# Altium schematic symbol library EC57-23 Stepper Motor.SchLib: 2 symbols
Pins are listed as number, name and electrical type; pins without a type are passive.

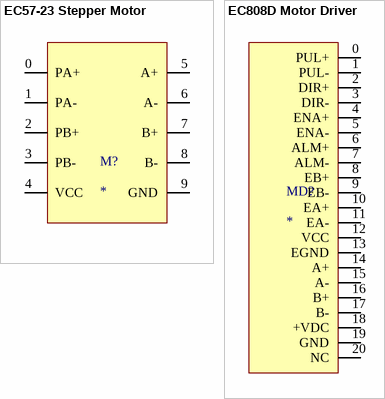
[diagram p0: symbols EC57-23 Stepper Motor to EC808D Motor Driver]

## EC57-23 Stepper Motor
designator M?
pins: 0 PA+, 1 PA-, 2 PB+, 3 PB-, 4 VCC (power), 5 A+, 6 A-, 7 B+, 8 B-, 9 GND (power)

## EC808D Motor Driver
designator MD?
pins: 0 PUL+, 1 PUL-, 2 DIR+, 3 DIR-, 4 ENA+, 5 ENA-, 6 ALM+, 7 ALM-, 8 EB+, 9 EB-, 10 EA+, 11 EA-, 12 VCC, 13 EGND, 14 A+, 15 A-, 16 B+, 17 B-, 18 +VDC, 19 GND, 20 NC